# Altium footprint library PcbLib1.PcbLib: 335 footprints (part 22 of 22)
Each footprint in its own frame and in the unit in brackets; x right, y up, seen from the top. Pads: shape width x height; smd on the part's side, far side on the other; paste and mask are expansions set on the pad; w line width, h text height; cw(c..) or ccw(c..) is an arc to the next point about the centre after c.
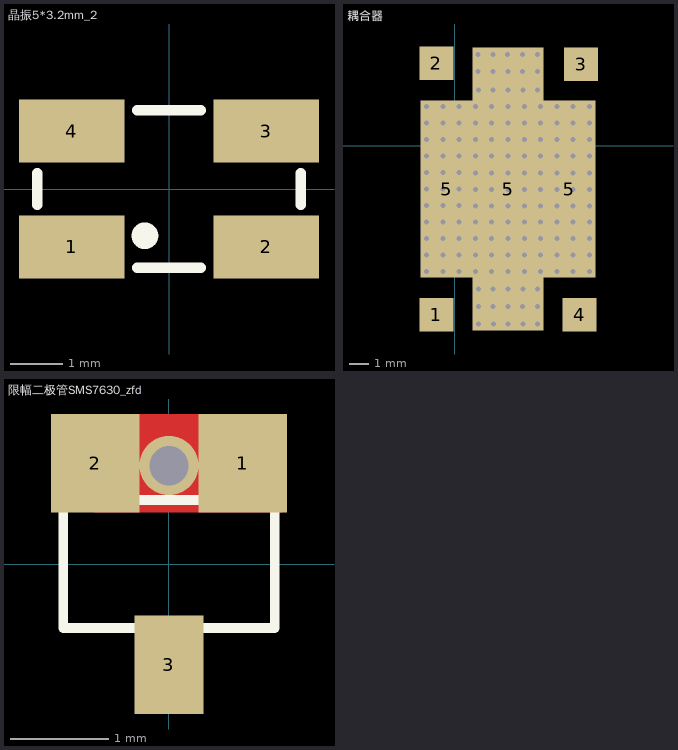
[diagram p21: the footprints below, top view; thin cyan lines are the x and y axes]

## 晶振5*3.2mm_2 [mm]
pads (4):
  rect 2x1.2 smd: 1(-1.85,-1.1) 2(1.85,-1.1) 3(1.85,1.1) 4(-1.85,1.1)
Top Overlay:
  circle w0.254: c-0.457,-0.889 r0.127
  lines w0.2: -2.5,-0.3 -2.5,0.3 ; -0.6,-1.5 0.6,-1.5 ; -0.6,1.5 0.6,1.5 ; 2.5,-0.3 2.5,0.3

## 耦合器 [mm]
pads (7):
  rect 1.7x1.7 smd mask+0: 1(-0.928,-8.469) 2(-0.928,4.151) 3(6.335,4.097) 4(6.262,-8.469)
  rect 2.62x8.88 smd mask+0: 5(-0.418,-2.159) 5(5.752,-2.159)
  rect 3.55x14.22 smd mask+0: 5(2.667,-2.159)
via 4.303,1.991 diameter 0.4 hole 0.25
via 3.41,2.816 diameter 0.4 hole 0.25
via 3.402,3.736 diameter 0.4 hole 0.25
via 3.392,4.597 diameter 0.4 hole 0.25
via 1.924,2.816 diameter 0.4 hole 0.25
via 1.916,3.736 diameter 0.4 hole 0.25
via 1.906,4.597 diameter 0.4 hole 0.25
via 1.173,3.736 diameter 0.4 hole 0.25
via 1.163,4.597 diameter 0.4 hole 0.25
via 4.153,2.816 diameter 0.4 hole 0.25
via 4.145,3.736 diameter 0.4 hole 0.25
via 4.135,4.597 diameter 0.4 hole 0.25
via 1.186,-8.921 diameter 0.4 hole 0.25
via 1.177,-8.053 diameter 0.4 hole 0.25
via 1.181,-7.185 diameter 0.4 hole 0.25
via 4.158,-8.921 diameter 0.4 hole 0.25
via 4.149,-8.053 diameter 0.4 hole 0.25
via 4.153,-7.185 diameter 0.4 hole 0.25
via 3.415,-8.921 diameter 0.4 hole 0.25
via 3.406,-8.053 diameter 0.4 hole 0.25
via 3.41,-7.185 diameter 0.4 hole 0.25
via 1.929,-8.921 diameter 0.4 hole 0.25
via 1.92,-8.053 diameter 0.4 hole 0.25
via 1.924,-7.185 diameter 0.4 hole 0.25
via -1.423,1.991 diameter 0.4 hole 0.25
via 1.849,1.991 diameter 0.4 hole 0.25
via 1.031,1.991 diameter 0.4 hole 0.25
via 0.213,1.991 diameter 0.4 hole 0.25
via -0.605,1.991 diameter 0.4 hole 0.25
via -1.423,1.162 diameter 0.4 hole 0.25
via 1.849,1.157 diameter 0.4 hole 0.25
via 1.031,1.157 diameter 0.4 hole 0.25
via 0.213,1.162 diameter 0.4 hole 0.25
via -0.605,1.162 diameter 0.4 hole 0.25
via -1.423,0.333 diameter 0.4 hole 0.25
via 1.849,0.323 diameter 0.4 hole 0.25
via 1.031,0.323 diameter 0.4 hole 0.25
via 0.213,0.333 diameter 0.4 hole 0.25
via -0.605,0.333 diameter 0.4 hole 0.25
via -1.423,-0.496 diameter 0.4 hole 0.25
via 1.849,-0.511 diameter 0.4 hole 0.25
via 1.031,-0.511 diameter 0.4 hole 0.25
via 0.213,-0.496 diameter 0.4 hole 0.25
via -0.605,-0.496 diameter 0.4 hole 0.25
via -1.423,-1.325 diameter 0.4 hole 0.25
via 1.849,-1.346 diameter 0.4 hole 0.25
via 1.031,-1.346 diameter 0.4 hole 0.25
via 0.213,-1.325 diameter 0.4 hole 0.25
via -0.605,-1.325 diameter 0.4 hole 0.25
via -1.423,-2.983 diameter 0.4 hole 0.25
via 1.849,-3.014 diameter 0.4 hole 0.25
via 1.031,-3.014 diameter 0.4 hole 0.25
via 0.213,-2.983 diameter 0.4 hole 0.25
via -0.605,-2.983 diameter 0.4 hole 0.25
via -1.423,-3.812 diameter 0.4 hole 0.25
via 1.849,-3.812 diameter 0.4 hole 0.25
via 1.031,-3.812 diameter 0.4 hole 0.25
via 0.213,-3.812 diameter 0.4 hole 0.25
via -0.605,-3.812 diameter 0.4 hole 0.25
via -1.423,-4.641 diameter 0.4 hole 0.25
via 1.849,-4.641 diameter 0.4 hole 0.25
via 1.031,-4.641 diameter 0.4 hole 0.25
via 0.213,-4.641 diameter 0.4 hole 0.25
via -0.605,-4.641 diameter 0.4 hole 0.25
via -1.423,-5.47 diameter 0.4 hole 0.25
via 1.849,-5.47 diameter 0.4 hole 0.25
via 1.031,-5.47 diameter 0.4 hole 0.25
via 0.213,-5.47 diameter 0.4 hole 0.25
via -0.605,-5.47 diameter 0.4 hole 0.25
via -1.423,-6.299 diameter 0.4 hole 0.25
via 1.849,-6.299 diameter 0.4 hole 0.25
via 1.031,-6.299 diameter 0.4 hole 0.25
via 0.213,-6.299 diameter 0.4 hole 0.25
via -0.605,-6.299 diameter 0.4 hole 0.25
via 6.757,-6.299 diameter 0.4 hole 0.25
via 3.485,-6.299 diameter 0.4 hole 0.25
via 4.303,-6.299 diameter 0.4 hole 0.25
via 5.121,-6.299 diameter 0.4 hole 0.25
via 5.939,-6.299 diameter 0.4 hole 0.25
via 6.757,-5.47 diameter 0.4 hole 0.25
via 3.485,-5.47 diameter 0.4 hole 0.25
via 4.303,-5.47 diameter 0.4 hole 0.25
via 5.121,-5.47 diameter 0.4 hole 0.25
via 5.939,-5.47 diameter 0.4 hole 0.25
via 6.757,-4.641 diameter 0.4 hole 0.25
via 3.485,-4.641 diameter 0.4 hole 0.25
via 4.303,-4.641 diameter 0.4 hole 0.25
via 5.121,-4.641 diameter 0.4 hole 0.25
via 5.939,-4.641 diameter 0.4 hole 0.25
via 6.757,-3.812 diameter 0.4 hole 0.25
via 3.485,-3.812 diameter 0.4 hole 0.25
via 4.303,-3.812 diameter 0.4 hole 0.25
via 5.121,-3.812 diameter 0.4 hole 0.25
via 5.939,-3.812 diameter 0.4 hole 0.25
via 6.757,-3.014 diameter 0.4 hole 0.25
via 3.485,-3.014 diameter 0.4 hole 0.25
via 4.303,-3.014 diameter 0.4 hole 0.25
via 5.121,-3.014 diameter 0.4 hole 0.25
via 5.939,-3.014 diameter 0.4 hole 0.25
via 6.757,1.991 diameter 0.4 hole 0.25
via 3.485,1.991 diameter 0.4 hole 0.25
via 5.121,1.991 diameter 0.4 hole 0.25
via 5.939,1.991 diameter 0.4 hole 0.25
via 6.757,1.157 diameter 0.4 hole 0.25
via 3.485,1.157 diameter 0.4 hole 0.25
via 4.303,1.157 diameter 0.4 hole 0.25
via 5.121,1.157 diameter 0.4 hole 0.25
via 5.939,1.157 diameter 0.4 hole 0.25
via 6.757,0.323 diameter 0.4 hole 0.25
via 3.485,0.323 diameter 0.4 hole 0.25
via 4.303,0.323 diameter 0.4 hole 0.25
via 5.121,0.323 diameter 0.4 hole 0.25
via 5.939,0.323 diameter 0.4 hole 0.25
via 6.757,-0.511 diameter 0.4 hole 0.25
via 3.485,-0.511 diameter 0.4 hole 0.25
via 4.303,-0.511 diameter 0.4 hole 0.25
via 5.121,-0.511 diameter 0.4 hole 0.25
via 5.939,-0.511 diameter 0.4 hole 0.25
via 6.757,-1.346 diameter 0.4 hole 0.25
via 3.485,-1.346 diameter 0.4 hole 0.25
via 4.303,-1.346 diameter 0.4 hole 0.25
via 5.121,-1.346 diameter 0.4 hole 0.25
via 5.939,-1.346 diameter 0.4 hole 0.25
via 6.757,-2.18 diameter 0.4 hole 0.25
via 3.485,-2.18 diameter 0.4 hole 0.25
via 4.303,-2.18 diameter 0.4 hole 0.25
via 5.121,-2.18 diameter 0.4 hole 0.25
via 5.939,-2.18 diameter 0.4 hole 0.25
via -0.605,-2.154 diameter 0.4 hole 0.25
via 0.213,-2.154 diameter 0.4 hole 0.25
via 1.031,-2.18 diameter 0.4 hole 0.25
via 1.849,-2.18 diameter 0.4 hole 0.25
via -1.423,-2.154 diameter 0.4 hole 0.25
via 2.659,3.736 diameter 0.4 hole 0.25
via 2.667,2.816 diameter 0.4 hole 0.25
via 2.667,1.157 diameter 0.4 hole 0.25
via 2.667,0.323 diameter 0.4 hole 0.25
via 2.667,-0.511 diameter 0.4 hole 0.25
via 2.667,-1.346 diameter 0.4 hole 0.25
via 2.667,1.991 diameter 0.4 hole 0.25
via 2.667,-6.299 diameter 0.4 hole 0.25
via 2.667,-3.014 diameter 0.4 hole 0.25
via 2.667,-3.812 diameter 0.4 hole 0.25
via 2.667,-4.641 diameter 0.4 hole 0.25
via 2.667,-5.47 diameter 0.4 hole 0.25
via 2.667,-7.185 diameter 0.4 hole 0.25
via 2.663,-8.053 diameter 0.4 hole 0.25
via 2.667,-2.18 diameter 0.4 hole 0.25
via 2.649,4.597 diameter 0.4 hole 0.25
via 2.672,-8.921 diameter 0.4 hole 0.25
via 1.181,2.816 diameter 0.4 hole 0.25

## 限幅二极管SMS7630_zfd [mm]
pads (3):
  rect 0.9x1 smd: 1(0.75,1.025) 2(-0.75,1.025)
  rect 0.7x1 smd: 3(0,-1.025)
via 0,1.001 diameter 0.6 hole 0.4
Top Layer:
  region: 1.156,1.525 -0.761,1.525 -0.761,0.525 1.156,0.525
Top Overlay:
  lines w0.1: -1.075,-0.65 -1.075,0.65 1.075,0.65 1.075,-0.65 -1.075,-0.65
3D body: height 1.14, standoff 0, extent -1.057,-0.776 1.067,0.624